# Altium footprint library CustomCase.PcbLib: 411 footprints (part 22 of 26)
Each footprint in its own frame and in the unit in brackets; x right, y up, seen from the top. Pads: shape width x height; smd on the part's side, far side on the other; paste and mask are expansions set on the pad; w line width, h text height; cw(c..) or ccw(c..) is an arc to the next point about the centre after c.
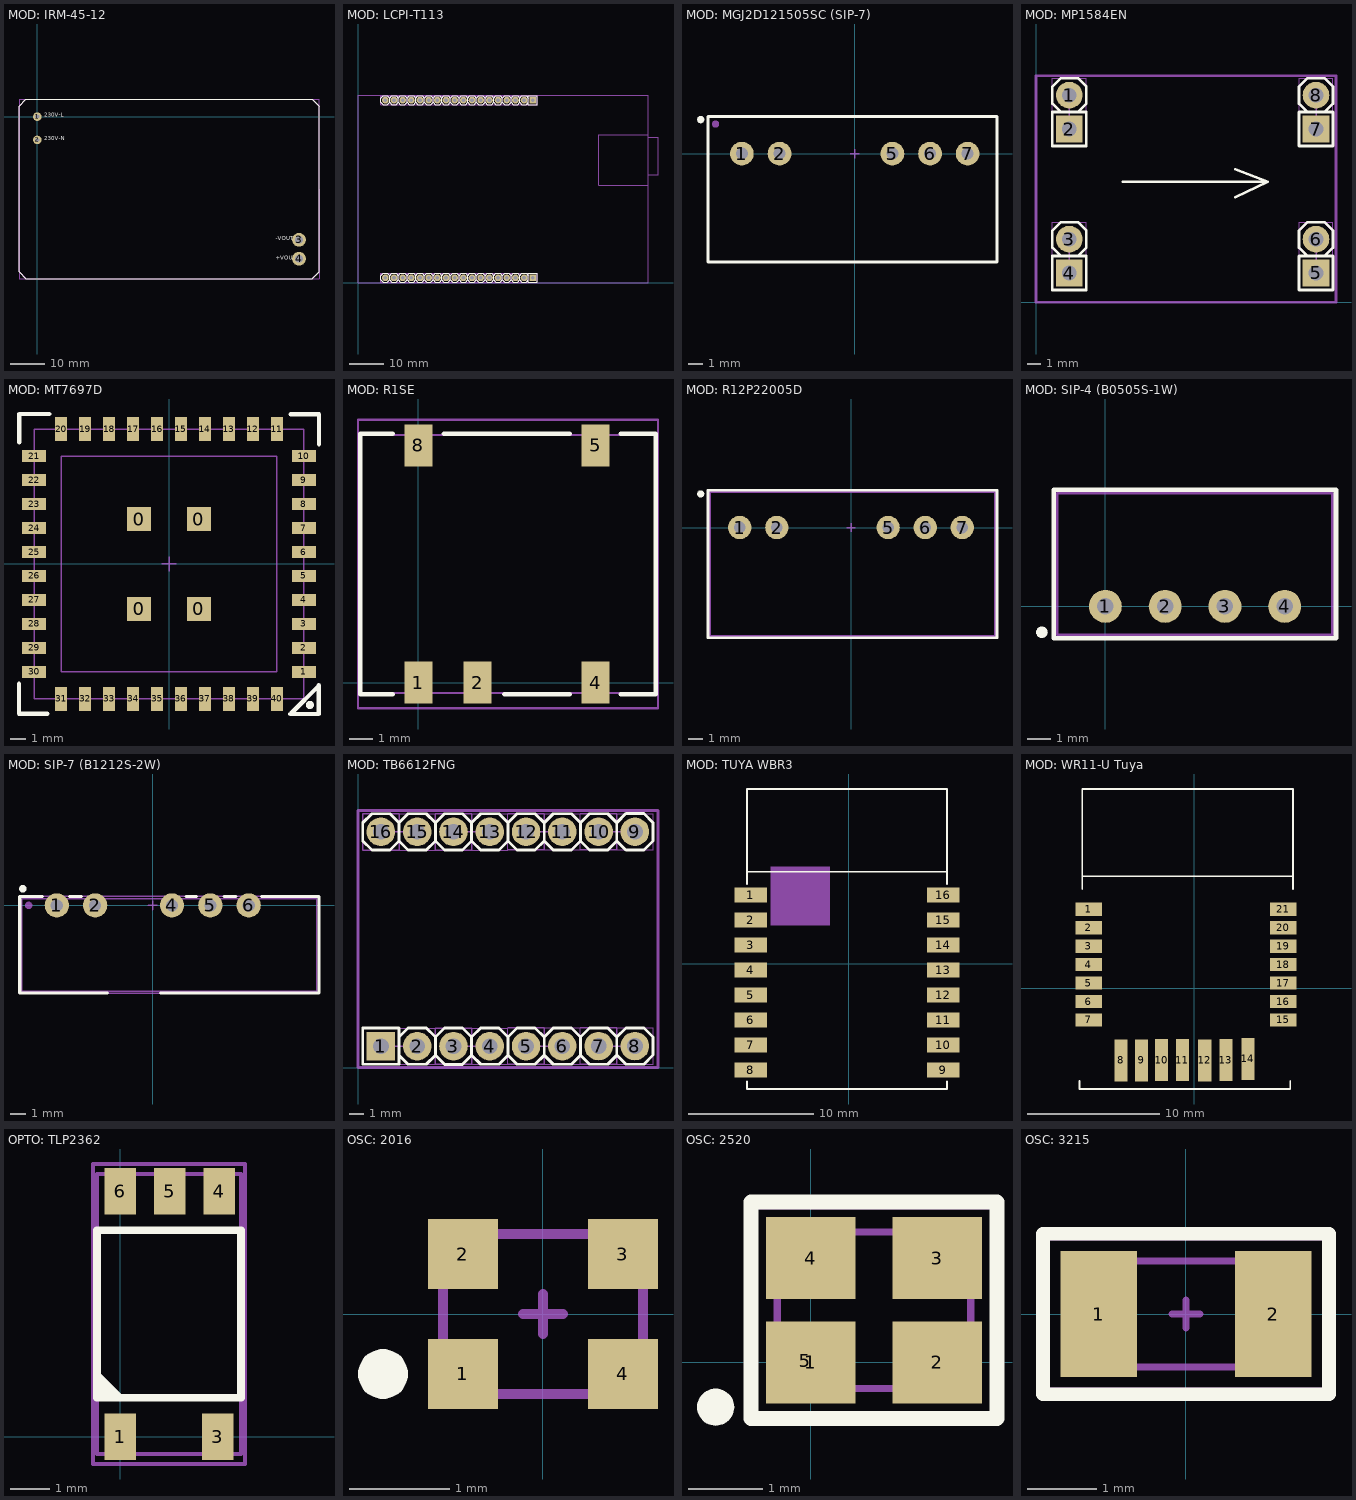
[diagram p21: the footprints below, top view; thin cyan lines are the x and y axes]

## MOD: IRM-45-12 [mm]
pads (4):
  round 2.5 hole 1.2: 1(0,0) 2(0,-6.75)
  round 4 hole 2.2: 3(76,-35.75) 4(76,-41.25)
Top Overlay:
  lines w0.2: -5.3,3 -5.3,-45.05 -3.3,-47.05 79.8,-47.05 81.8,-45.05 81.8,3 79.8,5 -3.3,5 -5.3,3 ; -5.3,3 -5.3,3
  text "-VOUT" at 69.25,-36.25 h2
  text "+VOUT" at 69.25,-42 h2
  text "230V-L" at 2,-0.5 h2
  text "230V-N" at 2,-7.25 h2
Top Assy:
  lines w0.1: -5.3,-45.05 -3.25,-47.1 79.75,-47.1 81.8,-45.05 81.8,3 79.8,5 -3.3,5 -5.3,3 -5.3,-45.05
  text "-VOUT" at 69.25,-36.25 h2
  text "+VOUT" at 69.25,-42 h2
  text "230V-N" at 2,-7.25 h2
  text "230V-L" at 2,-0.5 h2
Size Area:
  lines w0.1: -5.3,-47.1 -5.3,5.1 81.8,5.1 81.8,-47.1 -5.3,-47.1
3D body "IRM-45-15.step": height 29.51, standoff -3.5, extent -5.25,-47 81.75,5

## MOD: LCPI-T113 [mm]
pads (36):
  rect 2x2 hole 1.1: 1(51.18,53.5) 36(51.18,1.5)
  round 2 hole 1.1: 2(48.64,53.5) 3(46.1,53.5) 4(43.56,53.5) 5(41.02,53.5) 6(38.48,53.5) 7(35.94,53.5) 8(33.4,53.5) 9(30.86,53.5) 10(28.32,53.5) 11(25.78,53.5) 12(23.24,53.5) 13(20.7,53.5) 14(18.16,53.5) 15(15.62,53.5) 16(13.08,53.5) 17(10.54,53.5) 18(8,53.5) 19(8,1.5) 20(10.54,1.5) 21(13.08,1.5) 22(15.62,1.5) 23(18.16,1.5) 24(20.7,1.5) 25(23.24,1.5) 26(25.78,1.5) 27(28.32,1.5) 28(30.86,1.5) 29(33.4,1.5) 30(35.94,1.5) 31(38.48,1.5) 32(41.02,1.5) 33(43.56,1.5) 34(46.1,1.5) 35(48.64,1.5)
Top Overlay:
  drawing of 246 lines, arcs and shapes, not listed
Top Assy:
  drawing of 246 lines, arcs and shapes, not listed
Top Assembly:
  lines w0.2: 0,55 0,0 85,0 85,55 ; 0.003,55 85,55 ; 85,28.6 70.45,28.6 70.45,43.4 85,43.4 ; 85,31.6 87.85,31.6 87.85,42.6 85,42.6 ; 85,55 85,55
Size Area:
  lines w0.05: 6.73,0.23 6.73,2.77 11.81,2.77 52.45,2.77 52.45,0.23 11.81,0.23 6.73,0.23 ; 6.73,52.23 6.73,54.77 11.81,54.77 52.45,54.77 52.45,52.23 11.81,52.23 6.73,52.23
  lines w0.1: 31.63,1.5 32.63,1.5 ; 31.63,53.5 32.63,53.5 ; 32.13,1 32.13,2 ; 32.13,53 32.13,54
3D body: height 11, standoff 9.1, extent 70.45,28.6 85,43.4
3D body: height 10.1, standoff 9.1, extent 85,31.6 87.85,42.6
3D body: height 0.25, standoff -16.1, extent 0.25,0.15 0.25,0.15
3D body: height 0.25, standoff -16.1, extent 0.175,0.15 0.175,0.15
3D body: height 12.6, standoff 11, extent 0,0 85,55.001
3D body: height 0.25, standoff -16.1, extent 0.003,55 0.003,55
3D body: height 0.25, standoff -16.1, extent 16.9,35.675 16.9,35.675
3D body "PLS-16.STEP": height -4.01, standoff -15.55, extent 11.81,0.23 52.45,2.77
3D body "PLS-2.STEP": height -4.01, standoff -15.55, extent 6.763,0.215 11.843,2.755
3D body "PLS-16.STEP": height -4.01, standoff -15.55, extent 11.81,52.23 52.45,54.77
3D body "PLS-2.STEP": height -4.01, standoff -15.55, extent 6.763,52.215 11.843,54.755
3D body: height 15.9, standoff 11, extent 78,12.5 85,21.501
3D body: height 15.9, standoff 11, extent 78,33.275 85,42.276
3D body: height 14.7, standoff 11, extent 0,15.6 5.2,49.2
3D body "User Library-PBS-08.STEP": height 8.4, standoff -3.2, extent 32.134,52.232 52.454,54.772
3D body "User Library-PBS-10.STEP": height 8.4, standoff -3.2, extent 6.733,52.232 32.133,54.772
3D body "User Library-PBS-10.STEP": height 8.4, standoff -3.2, extent 6.725,0.225 32.125,2.765
3D body "User Library-PBS-08.STEP": height 8.4, standoff -3.2, extent 32.125,0.225 52.445,2.765
3D body: height 0.25, standoff -16.1, extent 70.125,35.95 70.125,35.95
3D body: height 0.25, standoff -16.1, extent 70.45,27.525 70.45,27.525
3D body: height 0.25, standoff -16.1, extent 70.7,27.75 70.7,27.75

## MOD: MGJ2D121505SC (SIP-7) [mm]
pads (7):
  round 1.6 hole 0.8: 1(-7.62,0) 2(-5.08,0) 5(2.54,0) 6(5.08,0) 7(7.62,0)
  round 0.5 on Top Overlay: ""(-10.4,2.3)
  round 0.5 on Mech1: ""(-9.4,2)
Top Overlay:
  lines w0.2: -9.9,-7.32 -9.9,2.5 9.6,2.5 9.6,-7.32 -9.9,-7.32
Top Assy:
  lines w0.1: -9.9,-7.32 -9.9,2.5 9.6,2.5 9.6,-7.32 -9.9,-7.32
Size Area:
  lines w0.1: -0.3,0 0.3,0 ; 0,-0.3 0,0.3 ; -9.9,-7.32 -9.9,2.5 9.6,2.5 9.6,-7.32 -9.9,-7.32
3D body "mps_dcdc_mgj2d_sc_a.step": height 12.6, standoff -4, extent -9.9,-7.32 9.6,2.5

## MOD: MP1584EN [mm]
pads (8):
  round 2 hole 1.1: 1(2.5,15.54) 3(2.5,4.74) 6(21,4.74) 8(21,15.54)
  rect 2x2 hole 1.1: 2(2.5,13) 4(2.5,2.2) 5(21,2.2) 7(21,13)
Top Overlay:
  lines w0.2: 1.865,3.47 1.23,4.105 1.23,5.375 1.865,6.01 3.135,6.01 3.77,5.375 3.77,4.105 3.135,3.47 ; 1.865,14.27 1.23,14.905 1.23,16.175 1.865,16.81 3.135,16.81 3.77,16.175 3.77,14.905 3.135,14.27 ; 6.525,9.05 17.375,9.05 ; 14.95,7.875 17.375,9.05 ; 14.95,9.975 17.375,9.05 ; 20.365,3.47 19.73,4.105 19.73,5.375 20.365,6.01 21.635,6.01 22.27,5.375 22.27,4.105 21.635,3.47 ; 20.365,14.27 19.73,14.905 19.73,16.175 20.365,16.81 21.635,16.81 22.27,16.175 22.27,14.905 21.635,14.27 ; 1.23,0.93 1.23,3.47 3.77,3.47 3.77,0.93 1.23,0.93 ; 1.23,11.73 1.23,14.27 3.77,14.27 3.77,11.73 1.23,11.73 ; 19.73,0.93 19.73,3.47 22.27,3.47 22.27,0.93 19.73,0.93 ; 19.73,11.73 19.73,14.27 22.27,14.27 22.27,11.73 19.73,11.73
Top Assy:
  lines w0.1: 1.865,3.47 1.23,4.105 1.23,5.375 1.865,6.01 3.135,6.01 3.77,5.375 3.77,4.105 3.135,3.47 ; 1.865,14.27 1.23,14.905 1.23,16.175 1.865,16.81 3.135,16.81 3.77,16.175 3.77,14.905 3.135,14.27 ; 20.365,3.47 19.73,4.105 19.73,5.375 20.365,6.01 21.635,6.01 22.27,5.375 22.27,4.105 21.635,3.47 ; 20.365,14.27 19.73,14.905 19.73,16.175 20.365,16.81 21.635,16.81 22.27,16.175 22.27,14.905 21.635,14.27 ; 1.23,0.93 1.23,3.47 3.77,3.47 3.77,0.93 1.23,0.93 ; 1.23,11.73 3.77,11.73 3.77,14.27 1.23,14.27 1.23,11.73 ; 19.73,0.93 19.73,3.47 22.27,3.47 22.27,0.93 19.73,0.93 ; 19.73,11.73 22.27,11.73 22.27,14.27 19.73,14.27 19.73,11.73
Top Assembly:
  lines w0.2: 0,0 22.5,0 22.5,17 0,17 0,0
Size Area:
  lines w0.05: 1.23,0.93 1.23,6.01 3.77,6.01 3.77,0.93 1.23,0.93 ; 1.23,11.73 3.77,11.73 3.77,16.81 1.23,16.81 1.23,11.73 ; 19.73,0.93 19.73,6.01 22.27,6.01 22.27,0.93 19.73,0.93 ; 19.73,11.73 22.27,11.73 22.27,16.81 19.73,16.81 19.73,11.73
  lines w0.1: 2,3.47 3,3.47 ; 2,14.27 3,14.27 ; 2.5,2.97 2.5,3.97 ; 2.5,13.77 2.5,14.77 ; 20.5,3.47 21.5,3.47 ; 20.5,14.27 21.5,14.27 ; 21,2.97 21,3.97 ; 21,13.77 21,14.77
3D body "PLS-2.STEP": height 4.44, standoff -7.1, extent 1.215,0.897 3.755,5.977
3D body "PLS-2.STEP": height 4.44, standoff -7.1, extent 19.715,0.897 22.255,5.977
3D body "PLS-2.STEP": height 4.44, standoff -7.1, extent 19.716,11.697 22.256,16.777
3D body: height 4.1, standoff 2.5, extent 0,0 22.5,17
3D body "PLS-2.STEP": height 4.44, standoff -7.1, extent 1.216,11.697 3.756,16.777
3D body: height 6.9, standoff 4.1, extent 12.5,7.825 19.2,14.525

## MOD: MT7697D [mm]
pads (44):
  rect 1.6x1.6 smd: 0(-2,-3) 0(-2,3) 0(2,-3) 0(2,3)
  rect 1.6x0.8 smd: 1(9,-7.2) 2(9,-5.6) 3(9,-4) 4(9,-2.4) 5(9,-0.8) 6(9,0.8) 7(9,2.4) 8(9,4) 9(9,5.6) 10(9,7.2) 21(-9,7.2) 22(-9,5.6) 23(-9,4) 24(-9,2.4) 25(-9,0.8) 26(-9,-0.8) 27(-9,-2.4) 28(-9,-4) 29(-9,-5.6) 30(-9,-7.2)
  rect 0.8x1.6 smd: 11(7.2,9) 12(5.6,9) 13(4,9) 14(2.4,9) 15(0.8,9) 16(-0.8,9) 17(-2.4,9) 18(-4,9) 19(-5.6,9) 20(-7.2,9) 31(-7.2,-9) 32(-5.6,-9) 33(-4,-9) 34(-2.4,-9) 35(-0.8,-9) 36(0.8,-9) 37(2.4,-9) 38(4,-9) 39(5.6,-9) 40(7.2,-9)
Top Overlay:
  circle w0.25: c9.4,-9.4 r0.146
  lines w0.3: -10.005,-8 -10.005,-10 -8.105,-10 ; -10,8.105 -10,10.005 -8,10.005 ; 8.1,-10.005 10,-10.005 10,-8.105 ; 8.105,10 10.005,10 10.005,8 ; 8.15,-9.95 10,-8.1
3D model:
  lines w0.1: -7.2,-7.2 -7.2,7.2 7.2,7.2 7.2,-7.2 -7.2,-7.2
Size Area:
  lines w0.1: -0.5,0 0.5,0 ; 0,-0.5 0,0.5 ; -9,-9 -9,9 9,9 9,-9 -9,-9
3D body: height 2.5, standoff 0.1, extent -9,-9 9,9

## MOD: R1SE [mm]
pads (5):
  rect 1.2x1.8 smd: 1(0,0) 2(2.54,0) 4(7.62,0) 5(7.62,10.2) 8(0,10.2)
Top Overlay:
  lines w0.2: -1.1,-0.5 -2.5,-0.5 -2.5,10.7 -1.1,10.7 ; 1.1,10.7 6.5,10.7 ; 3.7,-0.5 6.5,-0.5 ; 8.7,-0.5 10.2,-0.5 10.2,10.7 8.7,10.7
Top Assy:
  lines w0.1: -2.525,-0.45 10.225,-0.45 10.225,10.65 -2.525,10.65 -2.525,-0.45
Size Area:
  lines w0.1: -2.6,-1.1 -2.6,11.3 10.3,11.3 10.3,-1.1 -2.6,-1.1
3D body "User Library-RECOM_R1S-xxxx.STEP": height 7, standoff 0, extent -2.525,-0.45 10.225,10.65

## MOD: R12P22005D [mm]
pads (6):
  round 1.6 hole 0.8: 1(-7.62,0) 2(-5.08,0) 5(2.54,0) 6(5.08,0) 7(7.62,0)
  round 0.5 on Top Overlay: ""(-10.3,2.3)
Top Overlay:
  lines w0.2: -9.8,-7.55 10,-7.55 10,2.55 -9.8,2.55 -9.8,-7.55
Top Assy:
  lines w0.1: -9.65,-7.4 9.85,-7.4 9.85,2.4 -9.65,2.4 -9.65,-7.4
Size Area:
  lines w0.1: -0.3,0 0.3,0 ; 0,-0.3 0,0.3 ; -9.75,-7.5 9.95,-7.5 9.95,2.5 -9.75,2.5 -9.75,-7.5
3D body "SIP-7 (19.5x9.8x12.5).STEP": height 12.51, standoff -4.09, extent -9.65,-7.4 9.85,2.4

## MOD: SIP-4 (B0505S-1W) [mm]
pads (5):
  round 1.4 hole 0.7: 1(0,0) 2(2.54,0) 3(5.08,0) 4(7.62,0)
  round 0.5 on Top Overlay: ""(-2.7,-1.1)
Top Overlay:
  lines w0.2: -2.2,-1.35 9.8,-1.35 9.8,4.95 -2.2,4.95 -2.2,-1.35
Top Assy:
  lines w0.1: -2.042,-1.2 9.642,-1.2 9.642,4.8 -2.042,4.8 -2.042,-1.2
Size Area:
  lines w0.1: -2.15,-1.3 9.75,-1.3 9.75,4.9 -2.15,4.9 -2.15,-1.3
3D body "User Library-4-Lead SIP_AM1S-1205SZ_Aimtec_DC-DC_Converter_1_Watt.STEP": height 10.2, standoff -3, extent -2.042,-1.2 9.642,4.8

## MOD: SIP-7 (B1212S-2W) [mm]
pads (7):
  round 1.6 hole 0.8: 1(-6.35,0) 2(-3.81,0) 4(1.27,0) 5(3.81,0) 6(6.35,0)
  round 0.5 on Top Overlay: ""(-8.6,1.1)
  round 0.5 on Mech1: ""(-8.21,0)
Top Overlay:
  lines w0.2: -7.3,0.6 -8.8,0.6 -8.8,-5.8 -3,-5.8 ; -5.5,0.6 -4.7,0.6 ; 0.5,-5.8 11,-5.8 11,0.6 7.2,0.6 ; 2.2,0.6 2.9,0.6 ; 4.7,0.6 5.5,0.6
Top Assy:
  lines w0.1: -8.66,-5.67 -8.66,0.45 10.84,0.45 10.84,-5.67 -8.66,-5.67
Size Area:
  lines w0.1: -0.3,0 0.3,0 ; 0,-0.3 0,0.3 ; -8.8,-5.8 11,-5.8 11,0.6 -8.8,0.6 -8.8,-5.8
3D body "User Library-Traco TMA 0505S.STEP": height 10.2, standoff -3.2, extent -8.66,-5.67 10.84,0.45

## MOD: TB6612FNG [mm]
pads (16):
  rect 2x2 hole 1.1: 1(1.601,1.5)
  round 2 hole 1.1: 2(4.141,1.5) 3(6.681,1.5) 4(9.221,1.5) 5(11.76,1.503) 6(14.3,1.503) 7(16.84,1.505) 8(19.38,1.505) 9(19.38,16.505) 10(16.84,16.505) 11(14.3,16.502) 12(11.76,16.502) 13(9.22,16.5) 14(6.68,16.5) 15(4.14,16.5) 16(1.6,16.5)
Top Overlay:
  lines w0.2: 0.33,15.865 0.965,15.23 2.235,15.23 2.87,15.865 ; 0.33,15.868 0.33,17.138 ; 0.33,17.135 0.965,17.77 2.235,17.77 2.87,17.135 ; 2.871,0.865 3.506,0.23 4.776,0.23 5.411,0.865 5.411,2.135 4.776,2.77 3.506,2.77 2.871,2.135 ; 7.951,0.865 8.586,0.23 9.856,0.23 10.491,0.865 ; 7.951,2.135 8.586,2.77 9.856,2.77 10.491,2.135 ; 7.95,15.862 7.315,15.227 6.045,15.227 5.41,15.862 5.41,17.132 6.045,17.767 7.315,17.767 7.95,17.132 7.95,15.865 8.585,15.23 9.855,15.23 10.49,15.865 ; 7.95,17.135 8.585,17.77 9.855,17.77 10.49,17.135 ; 7.951,0.862 7.316,0.227 6.046,0.227 5.411,0.862 5.411,2.132 6.046,2.767 7.316,2.767 7.951,2.132 7.951,0.865 ; 10.49,0.868 10.49,2.138 ; 10.49,15.867 10.49,17.137 ; 13.031,0.865 12.396,0.23 11.126,0.23 10.491,0.865 ; 13.03,2.138 13.665,2.773 14.935,2.773 15.57,2.138 ; 13.03,15.864 12.395,15.229 11.125,15.229 10.49,15.864 ; 13.03,17.137 13.665,17.772 14.935,17.772 15.57,17.137 ; 15.57,0.87 15.57,2.14 ; 15.57,15.87 15.57,17.14 ; 18.111,0.867 17.476,0.232 16.206,0.232 15.571,0.867 ; 18.11,2.14 18.745,2.775 20.015,2.775 20.65,2.14 20.65,0.87 20.015,0.235 18.745,0.235 18.11,0.87 18.111,2.137 17.476,2.772 16.206,2.772 15.571,2.137 ; 18.11,15.867 17.475,15.232 16.205,15.232 15.57,15.867 ; 18.11,17.14 18.745,17.775 20.015,17.775 20.65,17.14 20.65,15.87 20.015,15.235 18.745,15.235 18.11,15.87 18.11,17.137 17.475,17.772 16.205,17.772 15.57,17.137 ; 2.87,15.865 3.505,15.23 4.775,15.23 5.41,15.865 5.41,17.135 4.775,17.77 3.505,17.77 2.87,17.135 ; 2.87,15.865 2.87,17.135 ; 10.491,0.865 10.491,2.135 ; 10.491,0.865 10.491,2.135 ; 10.491,2.135 11.126,2.77 12.396,2.77 13.031,2.135 13.031,0.868 13.665,0.233 14.935,0.233 15.57,0.868 ; 10.49,15.865 10.49,17.135 ; 10.49,15.864 10.49,17.134 ; 10.49,17.134 11.125,17.769 12.395,17.769 13.03,17.134 13.03,15.868 13.665,15.232 14.935,15.232 15.57,15.867 ; 15.57,0.868 15.57,2.138 ; 15.571,0.867 15.571,2.137 ; 15.57,15.867 15.57,17.137 ; 15.57,15.867 15.57,17.137 ; 0.331,0.23 0.331,2.77 2.871,2.77 2.871,0.23 0.331,0.23
Top Assy:
  lines w0.1: 2.871,0.865 3.506,0.23 4.776,0.23 5.411,0.865 5.411,2.135 4.776,2.77 3.506,2.77 2.871,2.135 ; 2.87,15.865 3.505,15.23 4.775,15.23 5.41,15.865 5.41,17.135 4.775,17.77 3.505,17.77 2.87,17.135 ; 7.951,0.865 8.586,0.23 9.856,0.23 10.491,0.865 10.491,2.135 9.856,2.77 8.586,2.77 7.951,2.135 ; 7.95,15.865 8.585,15.23 9.855,15.23 10.49,15.865 10.49,17.135 9.855,17.77 8.585,17.77 7.95,17.135 ; 10.49,0.233 13.03,0.233 13.03,2.773 10.49,2.773 ; 10.49,15.232 13.03,15.232 13.03,17.772 10.49,17.772 ; 13.03,0.868 13.665,0.233 14.935,0.233 15.57,0.868 15.57,2.138 14.935,2.773 13.665,2.773 13.03,2.138 ; 13.03,15.867 13.665,15.232 14.935,15.232 15.57,15.867 15.57,17.137 14.935,17.772 13.665,17.772 13.03,17.137 ; 15.57,0.235 18.11,0.235 18.11,2.775 15.57,2.775 ; 15.57,15.235 18.11,15.235 18.11,17.775 15.57,17.775 ; 18.11,0.87 18.745,0.235 20.015,0.235 20.65,0.87 20.65,2.14 20.015,2.775 18.745,2.775 18.11,2.14 ; 18.11,15.87 18.745,15.235 20.015,15.235 20.65,15.87 20.65,17.14 20.015,17.775 18.745,17.775 18.11,17.14 ; 0.331,0.23 0.331,2.77 2.871,2.77 2.871,0.23 0.331,0.23 ; 0.33,15.23 0.33,17.77 2.87,17.77 2.87,15.23 0.33,15.23 ; 5.411,0.23 5.411,2.77 7.951,2.77 7.951,0.23 5.411,0.23 ; 5.41,15.23 5.41,17.77 7.95,17.77 7.95,15.23 5.41,15.23
Top Assembly:
  lines w0.2: -0.003,0 -0.003,18 20.997,18 20.996,0 -0.003,0
Size Area:
  lines w0.05: 10.49,0.233 15.57,0.233 15.57,2.773 10.49,2.773 ; 10.49,15.232 15.57,15.232 15.57,17.772 10.49,17.772 ; 15.57,0.235 20.65,0.235 20.65,2.775 15.57,2.775 ; 15.57,15.235 20.65,15.235 20.65,17.775 15.57,17.775 ; 5.411,0.23 5.411,2.77 ; 5.411,0.23 0.331,0.23 0.331,2.77 5.411,2.77 ; 5.411,0.23 5.411,2.77 ; 5.411,0.23 10.491,0.23 10.491,2.77 5.411,2.77 ; 5.41,15.23 5.41,17.77 ; 5.41,15.23 0.33,15.23 0.33,17.77 5.41,17.77 ; 5.41,15.23 5.41,17.77 ; 5.41,15.23 10.49,15.23 10.49,17.77 5.41,17.77
  lines w0.1: 2.37,16.5 3.37,16.5 ; 2.371,1.5 3.371,1.5 ; 2.871,1 2.871,2 ; 2.87,16 2.87,17 ; 7.45,16.5 8.45,16.5 ; 7.451,1.5 8.451,1.5 ; 7.951,1 7.951,2 ; 7.95,16 7.95,17 ; 12.53,1.503 13.53,1.503 ; 12.53,16.502 13.53,16.502 ; 13.03,1.003 13.03,2.003 ; 13.03,16.002 13.03,17.002 ; 17.61,1.505 18.61,1.505 ; 17.61,16.505 18.61,16.505 ; 18.11,1.005 18.11,2.005 ; 18.11,16.005 18.11,17.005
3D body: height 4.1, standoff 2.5, extent -0.003,0 20.997,18
3D body "PLS-2.STEP": height 4.44, standoff -7.1, extent 0.297,0.245 5.377,2.785
3D body "PLS-2.STEP": height 4.44, standoff -7.1, extent 5.377,0.245 10.457,2.785
3D body "PLS-2.STEP": height 4.44, standoff -7.1, extent 10.457,0.247 15.537,2.787
3D body "PLS-2.STEP": height 4.44, standoff -7.1, extent 15.537,0.25 20.617,2.79
3D body "PLS-2.STEP": height 4.44, standoff -7.1, extent 0.297,15.245 5.377,17.785
3D body "PLS-2.STEP": height 4.44, standoff -7.1, extent 5.377,15.245 10.457,17.785
3D body "PLS-2.STEP": height 4.44, standoff -7.1, extent 10.456,15.247 15.536,17.787
3D body "PLS-2.STEP": height 4.44, standoff -7.1, extent 15.536,15.25 20.616,17.79

## MOD: TUYA WBR3 [mm]
pads (16):
  rect 2.6x1.2 smd: 1(-7.825,5.475) 2(-7.825,3.475) 3(-7.825,1.475) 4(-7.825,-0.525) 5(-7.825,-2.525) 6(-7.825,-4.525) 7(-7.825,-6.525) 8(-7.825,-8.525) 9(7.575,-8.525) 10(7.575,-6.525) 11(7.575,-4.525) 12(7.575,-2.525) 13(7.575,-0.525) 14(7.575,1.475) 15(7.575,3.475) 16(7.575,5.475)
Top Overlay:
  lines w0.127: -8.126,-9.39 -8.126,-10.025 7.875,-10.025 7.875,-9.39 ; -8.126,6.358 -8.126,13.975 7.875,13.975 7.875,6.358 ; -8.125,7.345 7.875,7.345
Top Assy:
  pour cut-out: -6.22,7.755 -1.521,7.755 -1.521,3.056 -6.22,3.056
3D body: height 0.8, standoff 0, extent -8.126,-10.025 7.876,13.975
3D body: height 2.8, standoff 0.8, extent -6.625,-8.525 6.375,6.575

## MOD: WR11-U Tuya [mm]
pads (21):
  rect 2x1 smd: 1(-8,6) 2(-8,4.6) 3(-8,3.2) 4(-8,1.8) 5(-8,0.4) 6(-8,-1) 7(-8,-2.4) 15(6.75,-2.4) 16(6.75,-1) 17(6.75,0.4) 18(6.75,1.8) 19(6.75,3.2) 20(6.75,4.6) 21(6.75,6)
  rect 1x3.2 smd: 8(-5.55,-5.475) 9(-4,-5.475) 10(-2.475,-5.45) 11(-0.9,-5.45) 12(0.8,-5.475) 13(2.4,-5.45) 14(4.075,-5.35)
Top Overlay:
  lines w0.127: -8.709,-7.64 -8.709,-7.005 ; -8.708,-7.64 7.292,-7.64 7.292,-7.005 ; -8.509,7.518 -8.509,15.135 ; -8.508,8.505 7.492,8.505 ; -8.508,15.135 7.492,15.135 7.492,7.518

## OPTO: TLP2362 [mm]
pads (6):
  rect 0.8x1.2 smd: 1(0,0) 3(2.5,0) 4(2.54,6.3) 5(1.27,6.3) 6(0,6.3)
  round 0.5 on Mech1: ""(-0.1,0.1)
Top Overlay:
  region: -0.6,1 0.12,1 -0.6,1.72
  lines w0.2: -0.6,1 -0.6,5.3 3.1,5.3 3.1,1 -0.6,1
Top Assy:
  lines w0.1: -0.6,-0.439 -0.6,6.739 3.1,6.739 3.1,-0.439 -0.6,-0.439
Size Area:
  lines w0.1: -0.7,-0.7 -0.7,7 3.2,7 3.2,-0.7 -0.7,-0.7
3D body "TLP2362.STEP": height 2.22, standoff -0.03, extent -0.6,-0.439 3.1,6.739

## OSC: 2016 [mm]
pads (5):
  rect 0.7x0.7 smd: 1(-0.8,-0.6) 2(-0.8,0.6) 3(0.8,0.6) 4(0.8,-0.6)
  round 0.5 on Top Overlay: ""(-1.6,-0.6)
Top Assy:
  lines w0.1: -1,-0.8 1,-0.8 1,0.8 -1,0.8 -1,-0.8
Size Area:
  lines w0.1: -0.2,0 0.2,0 ; 0,-0.2 0,0.2 ; -1,-0.8 1,-0.8 1,0.8 -1,0.8 -1,-0.8
3D body "User Library-XRCGB27M000F2P00R0.STEP": height 0.65, standoff 0, extent -1,-0.8 1,0.8

## OSC: 2520 [mm]
pads (6):
  rect 1.2x1.1 smd: 1(0,0) 2(1.7,0) 3(1.7,1.4) 4(0,1.4)
  round 0.5 on Mech1: 5(-0.075,0.025)
  round 0.5 on Top Overlay: ""(-1.275,-0.6)
Top Overlay:
  lines w0.2: -0.8,-0.75 2.5,-0.75 2.5,2.15 -0.8,2.15 -0.8,-0.75
Top Assy:
  lines w0.1: -0.45,-0.35 -0.45,1.75 2.15,1.75 2.15,-0.35 -0.45,-0.35
Size Area:
  lines w0.1: -0.8,-0.7 -0.8,2.1 2.5,2.1 2.5,-0.7 -0.8,-0.7
3D body "User Library-Crystal NDK NX2520SA series.STEP": height 0.55, standoff 0, extent -0.45,-0.35 2.15,1.75

## OSC: 3215 [mm]
pads (2):
  rect 1.1x1.8 smd: 1(-1.25,0) 2(1.25,0)
Top Overlay:
  lines w0.2: -2.05,-1.15 2.05,-1.15 2.05,1.15 -2.05,1.15 -2.05,-1.15
Top Assy:
  lines w0.1: -1.61,-0.76 -1.61,0.76 1.61,0.76 1.61,-0.76 -1.61,-0.76
Size Area:
  lines w0.1: -0.2,0 0.2,0 ; 0,-0.2 0,0.2 ; -2.05,-1.1 2.05,-1.1 2.05,1.1 -2.05,1.1 -2.05,-1.1
3D body "User Library-ABS07.STEP": height 0.91, standoff 0, extent -1.61,-0.76 1.61,0.76